# Altium schematic symbol library TPS61088RHLR.SchLib: 1 symbol
Pins are listed as number, name and electrical type; pins without a type are passive.

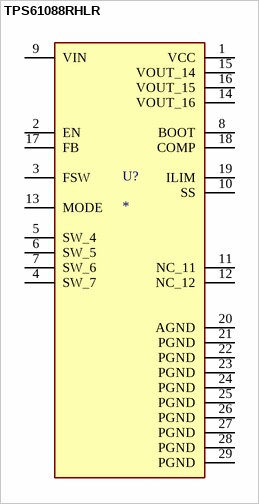
[diagram p0: symbol TPS61088RHLR]

## TPS61088RHLR
designator U?
MP: TPS61088RHLR; Availability: Unavailable; Value: *; Package: None; Price: None
footprint IC_TPS61088RHLR
pins: 1 VCC, 2 EN, 3 FSW, 4 SW_7, 5 SW_4, 6 SW_5, 7 SW_6, 8 BOOT, 9 VIN, 10 SS, 11 NC_11, 12 NC_12, 13 MODE, 14 VOUT_16, 15 VOUT_14, 16 VOUT_15, 17 FB, 18 COMP, 19 ILIM, 20 AGND (power), 21 PGND (power), 22 PGND (power), 23 PGND (power), 24 PGND (power), 25 PGND (power), 26 PGND (power), 27 PGND (power), 28 PGND (power), 29 PGND (power)